# Altium schematic symbol library C25804_0603WAF1002T5E.SchLib: 1 symbol
Pins are listed as number, name and electrical type; pins without a type are passive.

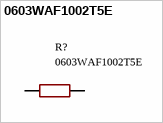
[diagram p0: symbol 0603WAF1002T5E]

## 0603WAF1002T5E
designator R?
10KΩ (1002) ±1%; Manufacturer: UNI-ROYAL(厚声); nameAlias: Value; SupplierPart: C25804; ManufacturerPart: 0603WAF1002T5E; Footprint: R0603; Source: JLCEDA/EasyEDA Official Library; JLCEDA: https://lceda.cn/; EasyEDA: https://easyeda.com/; Supplier: LCSC; Manufacturer Part: 0603WAF1002T5E; Supplier Part: C25804; Value: 10kΩ; JLCPCB Part Class: Basic Part
footprint R0603
pins: 1, 2